# Altium footprint library Footprint-Lib-PhilsLab.PcbLib: 544 footprints (part 2 of 34)
Each footprint in its own frame and in the unit in brackets; x right, y up, seen from the top. Pads: shape width x height; smd on the part's side, far side on the other; paste and mask are expansions set on the pad; w line width, h text height; cw(c..) or ccw(c..) is an arc to the next point about the centre after c.
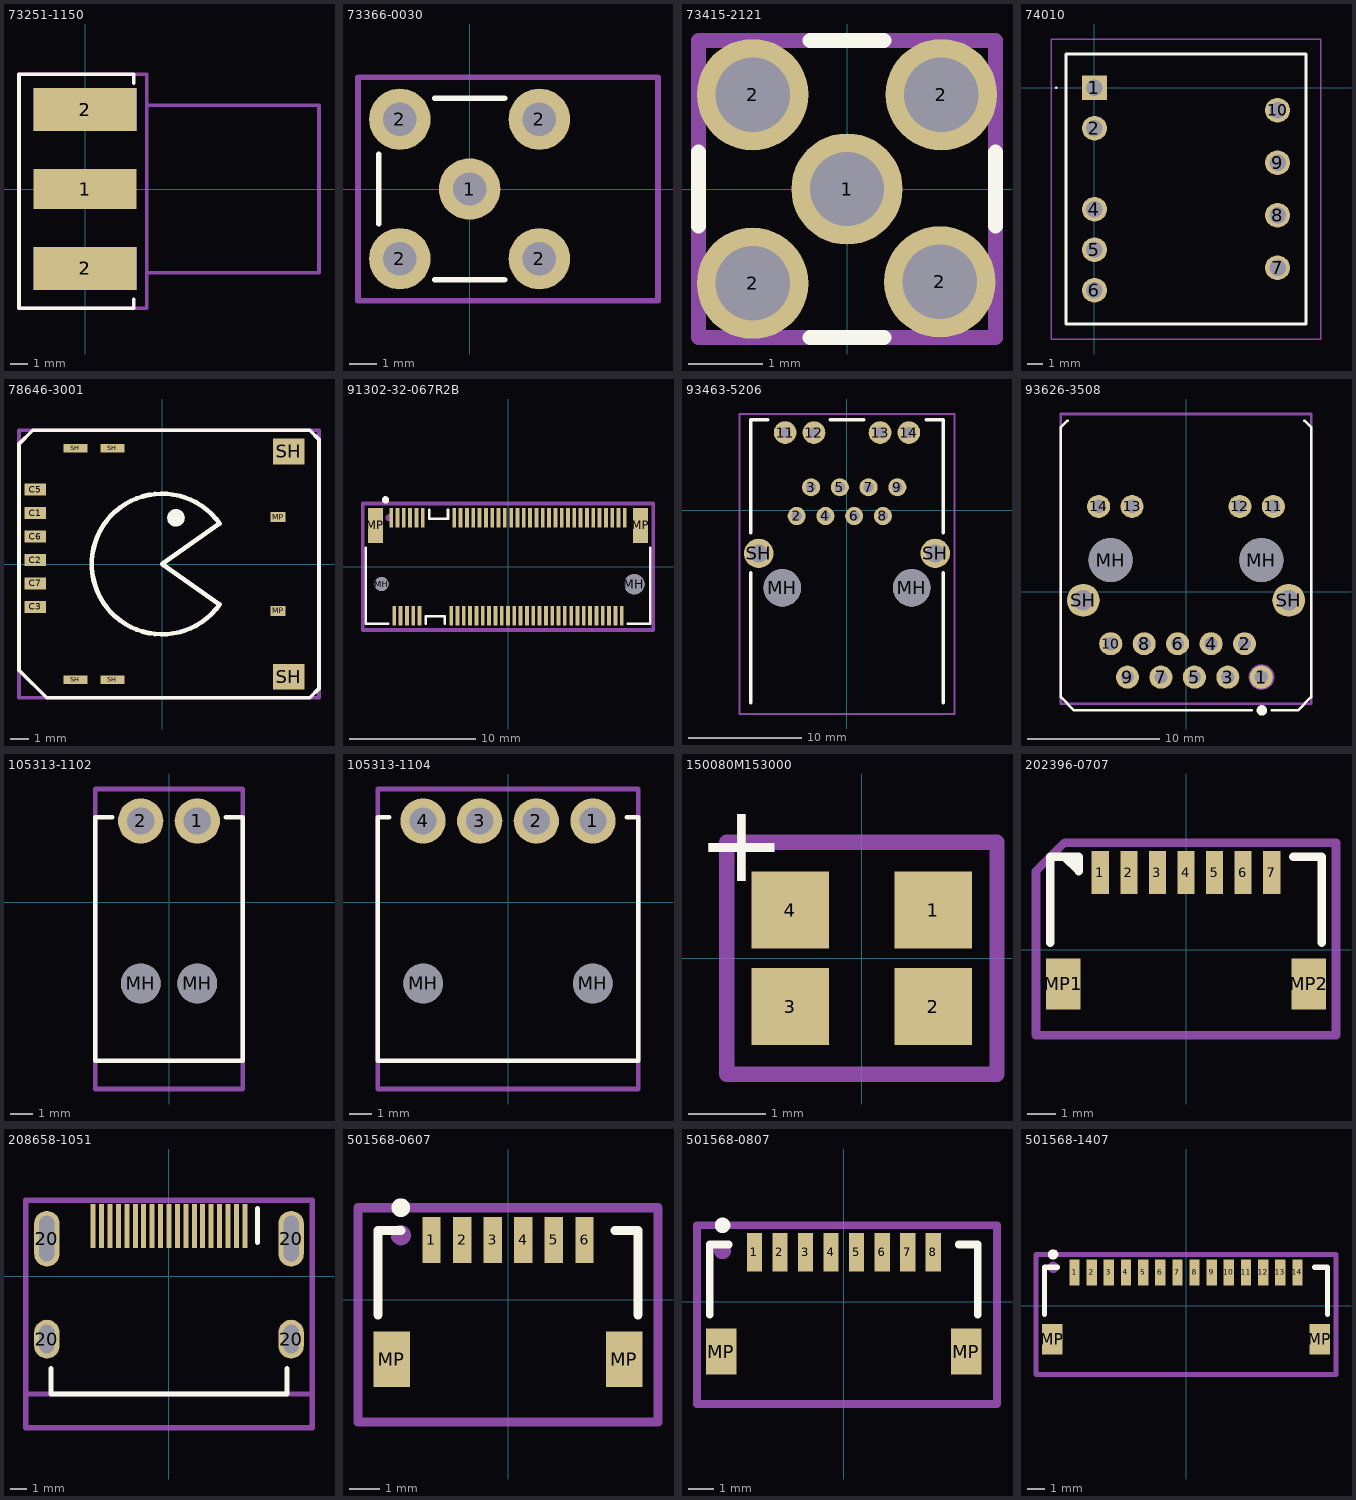
[diagram p1: the footprints below, top view; thin cyan lines are the x and y axes]

## 73251-1150 [mm]
pads (5):
  rect 5.84x2.29 smd: 1(0,0)
  rect 5.84x2.42 smd: 2(0,-4.5) 2(0,4.5)
  rect 5.84x2.42 smd far side: 2(0,-4.5) 2(0,4.5)
Top Overlay:
  lines w0.2: 2.75,-6.25 2.75,-6.75 ; 2.75,6 2.75,6.5 ; 2.75,-6.75 ccw(c2.75,-6.75) 2.75,-6.75 ; 2.75,-6.75 -3.75,-6.75 -3.75,6.5 2.75,6.5 ; 2.75,6.5 ccw(c2.75,6.5) 2.75,6.5
Mechanical 13:
  lines w0.2: 3.5,-4.75 13.25,-4.75 13.25,4.75 3.5,4.75 ; -3.75,-6.75 -3.75,6.5 3.5,6.5 3.5,-6.75 -3.75,-6.75
  text "'.Designator'" at -5.665,-0.417 h1
  text "PCB EDGE" at 4.15,2.1 h0.3
3D body "732511150.stp": height 4.36, standoff -3.57, extent -1.137,-4.75 13.137,4.775

## 73366-0030 [mm]
pads (5):
  round 2.2 hole 1.2: 1(0,0) 2(-2.5,-2.5) 2(-2.5,2.5) 2(2.5,-2.5) 2(2.5,2.5)
Top Overlay:
  lines w0.2: -3.25,-1.25 -3.25,1.25 ; -1.25,-3.25 1.25,-3.25 ; -1.25,3.25 1.25,3.25
Mechanical 13:
  lines w0.2: -4,-4 6.75,-4 6.75,4 -4,4 -4,-4
  text "'.Designator'" at -5.665,-0.417 h1
3D body "733660030.stp": height 6.31, standoff -3.69, extent -3,-3 6.53,3

## 73415-2121 [mm]
pads (5):
  round 1.5 hole 1 mask+0.07: 1(0,0) 2(-1.27,-1.27) 2(-1.27,1.27) 2(1.25,-1.25) 2(1.27,1.27)
Top Overlay:
  lines w0.2: -2,-0.5 -2,0.5 ; -0.5,-2 0.5,-2 ; -0.5,2 0.5,2 ; 2,-0.5 2,0.5
Mechanical 13:
  lines w0.2: -2,-2 -2,2 2,2 2,-2 -2,-2
  text "'.Designator'" at -5.665,-0.417 h1
3D body "734152121.stp": height 4.73, standoff -2.76, extent -1.725,-1.725 1.725,1.725

## 74010 [mm]
pads (9):
  rect 1.65x1.65 hole 1.1: 1(0,0)
  round 1.65 hole 1.1: 2(0,-2.7) 4(0,-8.1) 5(0,-10.8) 6(0,-13.5) 7(12.2,-12) 8(12.2,-8.5) 9(12.2,-5) 10(12.2,-1.5)
Top Overlay:
  lines w0.1: -2.6,0 cw(c-2.55,0) -2.5,0 cw(c-2.55,0) -2.6,0
  lines w0.2: -1.9,-15.75 -1.9,2.25 14.1,2.25 14.1,-15.75 -1.9,-15.75
Mechanical 13:
  lines w0.1: -1.9,-15.75 -1.9,2.25 14.1,2.25 14.1,-15.75 -1.9,-15.75
Mechanical 15:
  lines w0.1: -2.9,-16.75 -2.9,3.25 15.1,3.25 15.1,-16.75 -2.9,-16.75
3D body "74010.stp": height 17.6, standoff -5, extent -1.9,-15.75 14.1,2.25

## 78646-3001 [mm]
pads (14):
  rect 1.15x0.65 smd: C1(-6.865,2.755) C2(-6.865,0.215) C3(-6.865,-2.325) C5(-6.865,4.025) C6(-6.865,1.485) C7(-6.865,-1.055)
  rect 0.8x0.54 smd: MP(6.285,-2.54) MP(6.285,2.54)
  rect 1.3x0.45 smd: SH(-4.695,-6.27) SH(-4.695,6.27) SH(-2.695,-6.27) SH(-2.695,6.27)
  rect 1.7x1.4 smd: SH(6.865,-6.11) SH(6.865,6.1)
Top Overlay:
  circle w0.254: c0.75,2.5 r0.354
  circle w0.254: c0.75,2.5 r0.198
  lines w0.2: -7.75,-5.75 -7.75,5 -7.75,6.5 -7,7.25 8,7.25 8.5,6.75 8.5,-6.75 8,-7.25 -6.25,-7.25 -7.75,-5.75
  lines w0.25: 3.119,-2.184 0,0 3.119,2.184
  lines w0.254: 0.855,2.522 ccw(c0.75,2.5) 0.857,2.5 ; 3.119,-2.184 cw(c0,0) 3.119,2.184
Mechanical 13:
  lines w0.2: -7.75,-7.25 -7.75,-2.25 -7.75,7.25 8.5,7.25 8.5,-7.25 -7.75,-7.25
  text "'.Designator'" at -5.815,-0.9 h1
3D body "786463001.stp": height 1.46, standoff 0.01, extent -7.304,-6.556 8.146,6.494

## 91302-32-067R2B [mm]
pads (71):
  rect 0.3x1.55 smd mask+0.11: 1(-9.25,3.875) 2(-9,-3.875) 3(-8.75,3.875) 4(-8.5,-3.875) 5(-8.25,3.875) 6(-8,-3.875) 7(-7.75,3.875) 8(-7.5,-3.875) 9(-7.25,3.875) 10(-7,-3.875) 11(-6.75,3.875) 20(-4.5,-3.875) 21(-4.25,3.875) 22(-4,-3.875) 23(-3.75,3.875) 24(-3.5,-3.875) 25(-3.25,3.875) 26(-3,-3.875) 27(-2.75,3.875) 28(-2.5,-3.875) 29(-2.25,3.875) 30(-2,-3.875) 31(-1.75,3.875) 32(-1.5,-3.875) 33(-1.25,3.875) 34(-1,-3.875) 35(-0.75,3.875) 36(-0.5,-3.875) 37(-0.25,3.875) 38(0,-3.875) 39(0.25,3.875) 40(0.5,-3.875) 41(0.75,3.875) 42(1,-3.875) 43(1.25,3.875) 44(1.5,-3.875) 45(1.75,3.875) 46(2,-3.875) 47(2.25,3.875) 48(2.5,-3.875) 49(2.75,3.875) 50(3,-3.875) 51(3.25,3.875) 52(3.5,-3.875) 53(3.75,3.875) 54(4,-3.875) 55(4.25,3.875) 56(4.5,-3.875) 57(4.75,3.875) 58(5,-3.875) 59(5.25,3.875) 60(5.5,-3.875) 61(5.75,3.875) 62(6,-3.875) 63(6.25,3.875) 64(6.5,-3.875) 65(6.75,3.875) 66(7,-3.875) 67(7.25,3.875) 68(7.5,-3.875) 69(7.75,3.875) 70(8,-3.875) 71(8.25,3.875) 72(8.5,-3.875) 73(8.75,3.875) 74(9,-3.875) 75(9.25,3.875)
  round 1.1 hole 1.1 unplated: MH(-10,-1.375)
  round 1.6 hole 1.6 unplated: MH(10,-1.375)
  rect 1.2x2.75 smd: MP(-10.5,3.275) MP(10.5,3.275)
Top Overlay:
  circle w0.3: c-9.7,5.3 r0.141
  lines w0.2: -11.25,1.5 -11.25,-4.5 -9.5,-4.5 ; -6.5,-4.5 -6.5,-3.9 -5,-3.9 -5,-4.5 ; -6.25,4.5 -6.25,3.8 -4.75,3.8 -4.75,4.5 ; 9.5,-4.5 11.25,-4.5 11.25,1.5
Mechanical 13:
  circle w0.3: c-9.421,3.883 r0.127
  lines w0.3: -11.5,-5 -11.5,5 11.5,5 11.5,-5 -11.5,-5
  text ".Designator" at -4.998,-0.333 h1
3D body "91302-32-067R2B.STEP": height 3.06, standoff -0.69, extent -10.925,-4.225 10.925,4.178

## 93463-5206 [mm]
pads (16):
  round 1.6 hole 0.9: 2(-4.445,-0.51) 3(-3.175,2.03) 4(-1.905,-0.51) 5(-0.635,2.03) 6(0.635,-0.51) 7(1.905,2.03) 8(3.175,-0.51) 9(4.445,2.03)
  round 2 hole 1: 11(-5.46,6.86) 12(-2.92,6.86) 13(2.92,6.86) 14(5.46,6.86)
  round 3.3 hole 3.3 unplated: MH(-5.715,-6.86) MH(5.715,-6.86)
  round 2.6 hole 1.6: SH(-7.795,-3.81) SH(7.795,-3.81)
Top Overlay:
  lines w0.3: -8.5,-17 -8.5,-5.5 ; -8.5,-2 -8.5,8 -7,8 ; -1.5,8 1.5,8 ; 7,8 8.5,8 8.5,-2 ; 8.5,-17 8.5,-5.5
Mechanical 13:
  lines w0.2: -9.5,-18 -8,-18 9.5,-18 9.5,8.5 -9.5,8.5 -9.5,-18
  text ".Designator" at -4.998,-0.333 h1
3D body "93463-5206.stp": height 14.11, standoff -3.29, extent -8.12,-17.687 8.12,7.713

## 93626-3508 [mm]
pads (18):
  round 1.75 hole 1: 1(5.715,-6.48) 2(4.445,-3.94) 3(3.175,-6.48) 4(1.905,-3.94) 5(0.635,-6.48) 6(-0.635,-3.94) 7(-1.905,-6.48) 8(-3.175,-3.94) 9(-4.445,-6.48) 10(-5.715,-3.94)
  round 1.75 hole 1.02: 11(6.635,6.48) 12(4.095,6.48) 13(-4.095,6.48) 14(-6.635,6.48)
  round 3.34 hole 3.34 unplated: MH(-5.715,2.41) MH(5.715,2.41)
  round 2.5 hole 1.58: SH(-7.795,-0.64) SH(7.795,-0.64)
Top Overlay:
  circle w0.25: c5.764,-9.001 r0.113
  circle w0.25: c5.764,-9.001 r0.277
  lines w0.2: -9,13 -9.5,12.5 -9.5,-8 -8.5,-9 5,-9 ; 6.5,-9 8.5,-9 9.5,-8 9.5,12.5 9,13
Mechanical 13:
  circle w0.25: c5.735,-6.476 r0.854
  lines w0.2: -9.5,-8.5 9.5,-8.5 9.5,13.5 -9.5,13.5 -9.5,-2 -9.5,-8.5
  text "'.Designator'" at -5.84,-0.925 h1
3D body "93626-3508.stp": height 15.21, standoff -3.29, extent -9.069,-8.14 9.089,13.23

## 105313-1102 [mm]
pads (4):
  round 2 hole 1.2: 1(1.25,3.59) 2(-1.25,3.59)
  round 1.75 hole 1.75 unplated: MH(-1.25,-3.59) MH(1.25,-3.59)
Top Overlay:
  lines w0.2: -2.5,3.75 -3.25,3.75 -3.25,-7 3.25,-7 3.25,3.75 2.5,3.75
Mechanical 13:
  lines w0.2: -3.25,-8.25 3.25,-8.25 3.25,5 -3.25,5 -3.25,-8.25
  text "'.Designator'" at -5.665,-0.417 h1
3D body "105313-1102.stp": height 6.65, standoff -3.19, extent -2.97,-8.25 2.97,3.908

## 105313-1104 [mm]
pads (6):
  round 2 hole 1.2: 1(3.75,3.59) 2(1.25,3.59) 3(-1.25,3.59) 4(-3.75,3.59)
  round 1.75 hole 1.75 unplated: MH(-3.75,-3.59) MH(3.75,-3.59)
Top Overlay:
  lines w0.2: -5.25,3.75 -5.75,3.75 -5.75,-7 5.75,-7 5.75,3.75 5.25,3.75
Mechanical 13:
  lines w0.2: -5.75,-8.25 5.75,-8.25 5.75,5 -5.75,5 -5.75,-8.25
  text "'.Designator'" at -5.665,-0.417 h1
3D body "105313-1104.stp": height 6.65, standoff -3.19, extent -5.47,-8.25 5.47,3.908

## 150080M153000 [mm]
pads (4):
  rect 1x1 smd mask+0.15: 1(0.925,0.625) 2(0.925,-0.625) 3(-0.925,-0.625) 4(-0.925,0.625)
Top Overlay:
  text "+" at -2.133,1 h1
Mechanical 13:
  lines w0.2: -1.75,-1.5 -1.75,1.5 1.75,1.5 1.75,-1.5 -1.75,-1.5
  text "+" at -2.583,1.5 h1
  text "'.Designator'" at -5.665,-0.417 h1
3D body "150080M153000.stp": height 0.51, standoff 0.01, extent -1,-0.65 1,0.65

## 202396-0707 [mm]
pads (9):
  rect 0.6x1.5 smd: 1(-3,2.7) 2(-2,2.7) 3(-1,2.7) 4(0,2.7) 5(1,2.7) 6(2,2.7) 7(3,2.7)
  rect 1.2x1.8 smd: MP1(-4.3,-1.2) MP2(4.3,-1.2)
Top Overlay:
  lines w0.3: -4.75,0.25 -4.75,3.25 -3.75,3.25 -3.75,2.75 ; -4.25,3.25 -3.75,2.75 ; 3.75,3.25 4.75,3.25 4.75,0.25 ; -3.75,2.75 -3.75,2.75 ; -3.75,2.75 -3.75,2.75
Mechanical 13:
  lines w0.3: -5.25,-3 -5.25,2.75 -4.25,3.75 5.25,3.75 5.25,-3 -5.25,-3
  text "'.Designator'" at -5.84,-0.925 h1
3D body "202396-0707.stp": height 4.71, standoff 0.01, extent -4.5,-2.725 4.5,3.175

## 208658-1051 [mm]
pads (23):
  rect 0.3x2.6 smd mask+0.07: 1(4.5,2.98) 2(4,2.98) 3(3.5,2.98) 4(3,2.98) 5(2.5,2.98) 6(2,2.98) 7(1.5,2.98) 8(1,2.98) 9(0.5,2.98) 10(0,2.98) 11(-0.5,2.98) 12(-1,2.98) 13(-1.5,2.98) 14(-2,2.98) 15(-2.5,2.98) 16(-3,2.98) 17(-3.5,2.98) 18(-4,2.98) 19(-4.5,2.98)
  oval 1.5x2.3 hole 0.9 slot 1.7 at 90 deg mask+0.07: 20(-7.25,-3.74) 20(7.25,-3.74)
  oval 1.5x3.3 hole 0.9 slot 2.7 at 90 deg mask+0.07: 20(-7.25,2.22) 20(7.25,2.22)
Top Overlay:
  lines w0.3: -7,-5.5 -7,-7 7,-7 7,-5.5 ; 5.25,2 5.25,4
Mechanical 13:
  lines w0.3: -8.5,-7 8.5,-7 ; -8.5,-9 -8.5,-4.5 -8.5,4.5 8.5,4.5 8.5,-9 -8.5,-9
  text "'.Designator'" at -5.84,-0.925 h1
3D body "208658-1051.stp": height 6.19, standoff -2.61, extent -7.497,-8.548 7.506,3.887

## 501568-0607 [mm]
pads (8):
  rect 0.6x1.5 smd: 1(-2.5,1.95) 2(-1.5,1.95) 3(-0.5,1.95) 4(0.5,1.95) 5(1.5,1.95) 6(2.5,1.95)
  rect 1.2x1.8 smd: MP(-3.8,-1.95) MP(3.8,-1.95)
Top Overlay:
  circle w0.5: c-3.5,3 r0.054
  lines w0.3: -4.25,-0.5 -4.25,2.25 -3.5,2.25 ; 3.5,2.25 4.25,2.25 4.25,-0.5
Mechanical 13:
  circle w0.5: c-3.5,2.1 r0.078
  lines w0.3: -4.9,-4 -4.9,3 4.9,3 4.9,-4 -4.9,-4
  text "'.Designator'" at -5.815,-0.9 h1
3D body "501568-0607.stp": height 4.71, standoff 0.01, extent -4,-3.5 4,2.4

## 501568-0807 [mm]
pads (10):
  rect 0.6x1.5 smd: 1(-3.5,1.95) 2(-2.5,1.95) 3(-1.5,1.95) 4(-0.5,1.95) 5(0.5,1.95) 6(1.5,1.95) 7(2.5,1.95) 8(3.5,1.95)
  rect 1.2x1.8 smd: MP(-4.8,-1.95) MP(4.8,-1.95)
Top Overlay:
  circle w0.5: c-4.75,3 r0.054
  lines w0.3: -5.25,-0.5 -5.25,2.25 -4.5,2.25 ; 4.5,2.25 5.25,2.25 5.25,-0.5
Mechanical 13:
  circle w0.5: c-4.75,2 r0.078
  lines w0.3: -5.75,-4 6,-4 6,3 -5.75,3 -5.75,-4
  text "'.Designator'" at -5.815,-0.9 h1
3D body "501568-0807.stp": height 4.71, standoff 0.01, extent -5,-3.5 5,2.4

## 501568-1407 [mm]
pads (16):
  rect 0.6x1.5 smd: 1(-6.5,1.95) 2(-5.5,1.95) 3(-4.5,1.95) 4(-3.5,1.95) 5(-2.5,1.95) 6(-1.5,1.95) 7(-0.5,1.95) 8(0.5,1.95) 9(1.5,1.95) 10(2.5,1.95) 11(3.5,1.95) 12(4.5,1.95) 13(5.5,1.95) 14(6.5,1.95)
  rect 1.2x1.8 smd: MP(-7.8,-1.95) MP(7.8,-1.95)
Top Overlay:
  circle w0.5: c-7.75,3 r0.054
  lines w0.3: -8.25,-0.5 -8.25,2.25 -7.5,2.25 ; 7.5,2.25 8.25,2.25 8.25,-0.5
Mechanical 13:
  circle w0.5: c-7.75,2.25 r0.078
  lines w0.3: -8.75,-4 8.75,-4 8.75,3 -8.75,3 -8.75,-4
  text "'.Designator'" at -5.815,-0.9 h1
3D body "501568-1407.stp": height 4.71, standoff 0.01, extent -8,-3.5 8,2.4